# Altium schematic symbol library SnapEDAsch.SchLib: 1 symbol
Pins are listed as number, name and electrical type; pins without a type are passive.

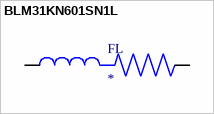
[diagram p0: symbol BLM31KN601SN1L]

## BLM31KN601SN1L
designator FL
600 Ohms @ 100MHz 1 Power Line Ferrite Bead 1206 _3216 Metric_ 2.9A 38mOhm; MP: BLM31KN601SN1L; MF: Murata; Availability: Unavailable; SnapEDA_Link: https://www.snapeda.com/parts/BLM31KN601SN1L/Murata/view-part/4302166/?ref=snap; Package: 3216 Murata; Price: None; Value: *
footprint BEADC3216X180N
pins: 1, 2